# Altium footprint library WR-TBL_Pluggable Connector_3.50mm.PcbLib: 175 footprints (part 2 of 11)
Each footprint in its own frame and in the unit in brackets; x right, y up, seen from the top. Pads: shape width x height; smd on the part's side, far side on the other; paste and mask are expansions set on the pad; w line width, h text height; cw(c..) or ccw(c..) is an arc to the next point about the centre after c.
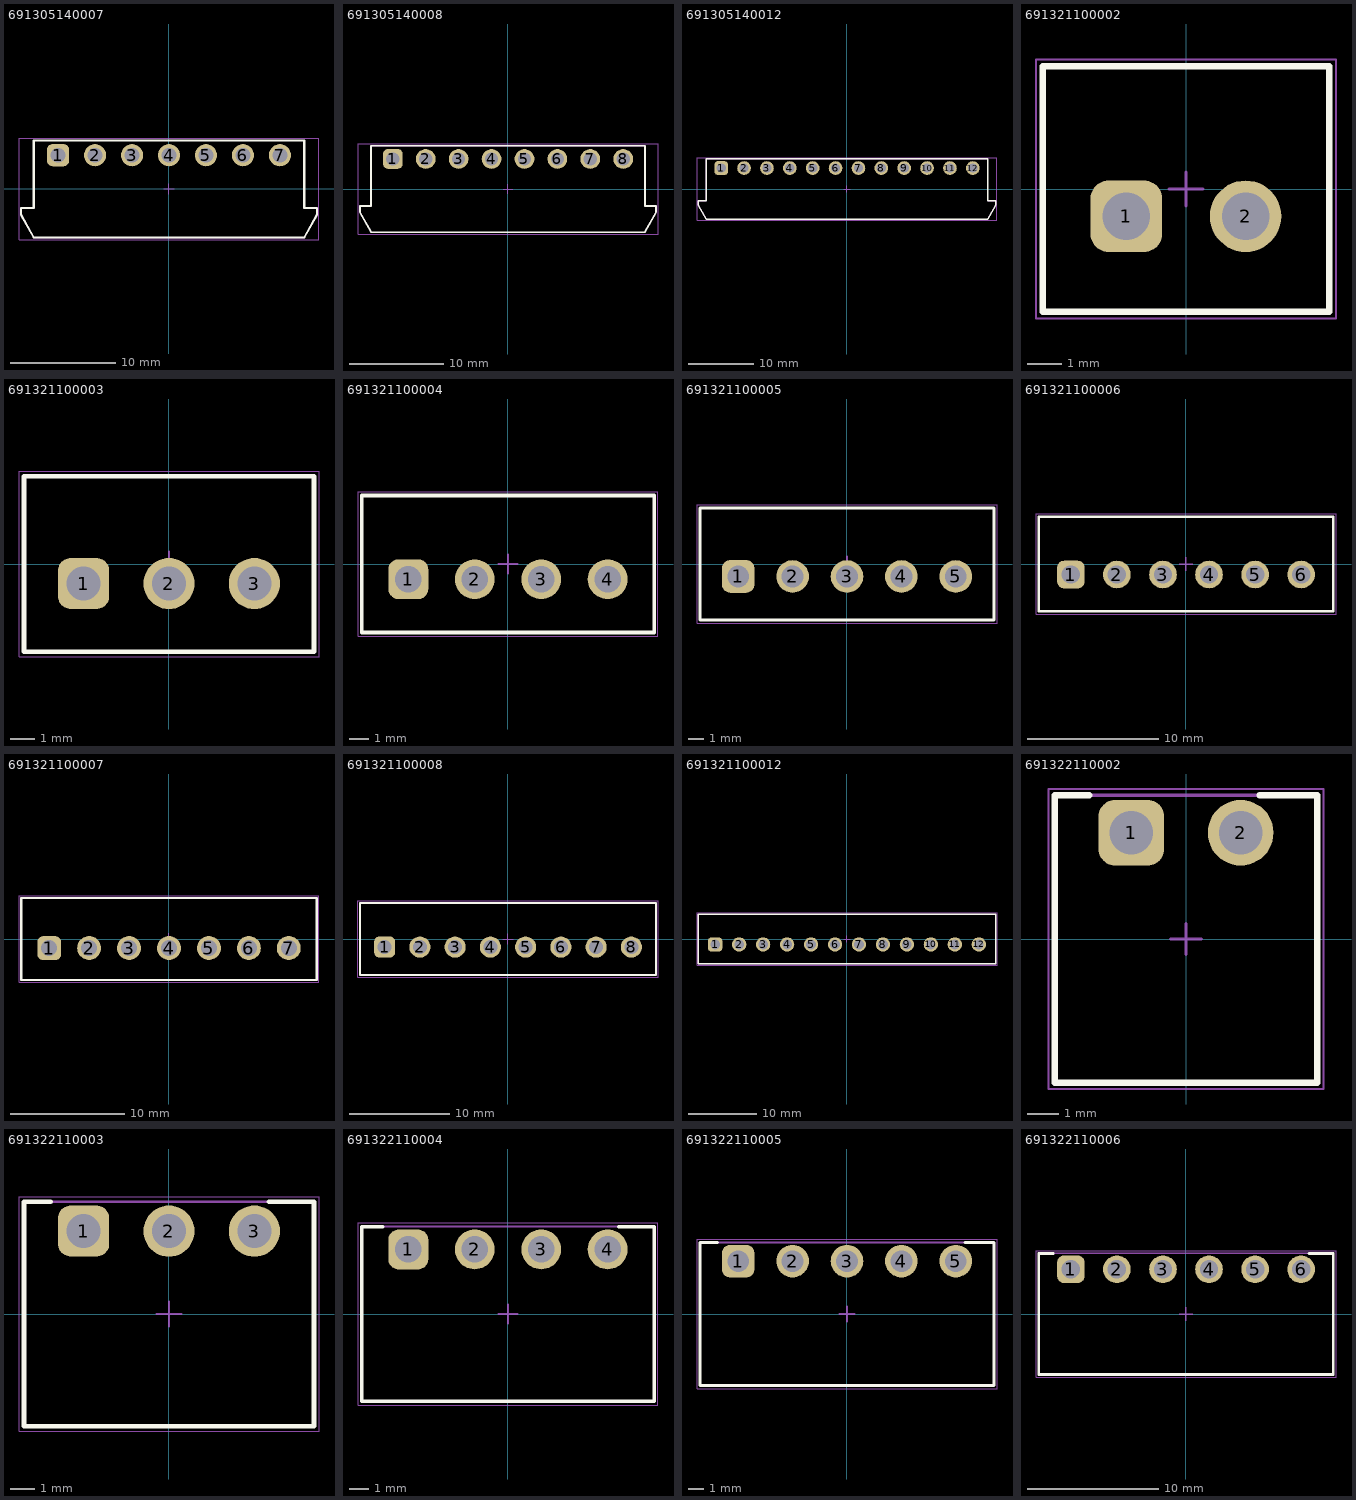
[diagram p1: the footprints below, top view; thin cyan lines are the x and y axes]

## 691305140007 [mm] "Horizontal PCB Header with Plastic Latch, pitch 3.5mm, 07p"
height 7
pads (7):
  rrect50% 2.1x2.1 hole 1.4: 1(-10.5,3.2)
  round 2.1 hole 1.4: 2(-7,3.2) 3(-3.5,3.2) 4(0,3.2) 5(3.5,3.2) 6(7,3.2) 7(10.5,3.2)
Top Overlay:
  lines w0.2: -14.001,-2.451 -12.8,-4.6 12.8,-4.6 14.001,-2.451 ; -14,-2.45 -14,-1.8 -12.8,-1.8 -12.8,4.6 12.8,4.6 12.8,-1.8 14,-1.8 14,-2.45
Top Assembly:
  lines w0.1: -14.001,-2.451 -12.8,-4.6 12.8,-4.6 14.001,-2.451 ; -14,-2.45 -14,-1.8 -12.8,-1.8 -12.8,4.6 12.8,4.6 12.8,-1.8 14,-1.8 14,-2.45
Top Designator:
  text ".Designator" at -3.647,-0.357 h1
Top 3D Body:
  lines w0.1: -14.001,-2.451 -12.8,-4.6 12.8,-4.6 14.001,-2.451 ; -14,-2.45 -14,-1.8 -12.8,-1.8 -12.8,4.6 12.8,4.6 12.8,-1.8 14,-1.8 14,-2.45
Top Courtyard:
  lines w0.05: -14.2,-4.8 -14.2,4.8 14.2,4.8 14.2,-4.8 -14.2,-4.8
Top Component Center:
  lines w0.1: -0.5,0 0.5,0 ; 0,-0.5 0,0.5
3D body "691305140007.stp": height 7.25, standoff -3.45, extent -14,-4.6 14,4.6

## 691305140008 [mm] "Horizontal PCB Header with Plastic Latch, pitch 3.5mm, 08p"
height 7
pads (8):
  rrect50% 2.1x2.1 hole 1.4: 1(-12.25,3.2)
  round 2.1 hole 1.4: 2(-8.75,3.2) 3(-5.25,3.2) 4(-1.75,3.2) 5(1.75,3.2) 6(5.25,3.2) 7(8.75,3.2) 8(12.25,3.2)
Top Overlay:
  lines w0.2: -15.751,-2.451 -14.55,-4.6 14.55,-4.6 15.751,-2.451 ; -15.75,-2.45 -15.75,-1.8 -14.55,-1.8 -14.55,4.6 14.55,4.6 14.55,-1.8 15.75,-1.8 15.75,-2.45
Top Assembly:
  lines w0.1: -15.751,-2.451 -14.55,-4.6 14.55,-4.6 15.751,-2.451 ; -15.75,-2.45 -15.75,-1.8 -14.55,-1.8 -14.55,4.6 14.55,4.6 14.55,-1.8 15.75,-1.8 15.75,-2.45
Top Designator:
  text ".Designator" at -3.647,-0.357 h1
Top 3D Body:
  lines w0.1: -15.751,-2.451 -14.55,-4.6 14.55,-4.6 15.751,-2.451 ; -15.75,-2.45 -15.75,-1.8 -14.55,-1.8 -14.55,4.6 14.55,4.6 14.55,-1.8 15.75,-1.8 15.75,-2.45
Top Courtyard:
  lines w0.05: -15.95,-4.8 -15.95,4.8 15.95,4.8 15.95,-4.8 -15.95,-4.8
Top Component Center:
  lines w0.1: -0.5,0 0.5,0 ; 0,-0.5 0,0.5
3D body "691305140008.stp": height 7.25, standoff -3.45, extent -15.75,-4.6 15.75,4.6

## 691305140012 [mm] "Horizontal PCB Header with Plastic Latch, pitch 3.5mm, 12p"
height 7
pads (12):
  rrect50% 2.1x2.1 hole 1.4: 1(-19.25,3.2)
  round 2.1 hole 1.4: 2(-15.75,3.2) 3(-12.25,3.2) 4(-8.75,3.2) 5(-5.25,3.2) 6(-1.75,3.2) 7(1.75,3.2) 8(5.25,3.2) 9(8.75,3.2) 10(12.25,3.2) 11(15.75,3.2) 12(19.25,3.2)
Top Overlay:
  lines w0.2: -22.751,-2.451 -21.55,-4.6 21.55,-4.6 22.751,-2.451 ; -22.75,-2.45 -22.75,-1.8 -21.55,-1.8 -21.55,4.6 21.55,4.6 21.55,-1.8 22.75,-1.8 22.75,-2.45
Top Assembly:
  lines w0.1: -22.751,-2.451 -21.55,-4.6 21.55,-4.6 22.751,-2.451 ; -22.75,-2.45 -22.75,-1.8 -21.55,-1.8 -21.55,4.6 21.55,4.6 21.55,-1.8 22.75,-1.8 22.75,-2.45
Top Designator:
  text ".Designator" at -3.647,-0.357 h1
Top 3D Body:
  lines w0.1: -22.751,-2.451 -21.55,-4.6 21.55,-4.6 22.751,-2.451 ; -22.75,-2.45 -22.75,-1.8 -21.55,-1.8 -21.55,4.6 21.55,4.6 21.55,-1.8 22.75,-1.8 22.75,-2.45
Top Courtyard:
  lines w0.05: -22.95,-4.8 22.95,-4.8 22.95,4.8 -22.95,4.8 -22.95,-4.8
Top Component Center:
  lines w0.1: -0.5,0 0.5,0 ; 0,-0.5 0,0.5
3D body "691305140012.stp": height 7.25, standoff -3.45, extent -22.75,-4.6 22.75,4.6

## 691321100002 [mm] "Vertical PCB Header, pitch 3.5mm, 02p"
height 9.2
pads (2):
  rrect50% 2.1x2.1 hole 1.4: 1(-1.75,-0.8)
  round 2.1 hole 1.4: 2(1.75,-0.8)
Top Overlay:
  lines w0.2: -4.2,-3.6 4.2,-3.6 4.2,3.6 -4.2,3.6 -4.2,-3.6
Top Assembly:
  lines w0.1: -4.2,-3.6 -4.2,3.6 4.2,3.6 4.2,-3.6 -4.2,-3.6
Top Designator:
  text ".Designator" at -3.647,-0.357 h1
Top 3D Body:
  lines w0.1: -4.2,-3.6 4.2,-3.6 4.2,3.6 -4.2,3.6 -4.2,-3.6
Top Courtyard:
  lines w0.05: -4.4,-3.8 4.4,-3.8 4.4,3.8 -4.4,3.8 -4.4,-3.8
Top Component Center:
  lines w0.1: -0.5,0 0.5,0 ; 0,-0.5 0,0.5
3D body "691321100002.stp": height 9.3, standoff -3.4, extent -4.2,-3.6 4.2,3.6

## 691321100003 [mm] "Vertical PCB Header, pitch 3.5mm, 03p"
height 9.2
pads (3):
  rrect50% 2.1x2.1 hole 1.4: 1(-3.5,-0.8)
  round 2.1 hole 1.4: 2(0,-0.8) 3(3.5,-0.8)
Top Overlay:
  lines w0.2: -5.95,-3.6 5.95,-3.6 5.95,3.6 -5.95,3.6 -5.95,-3.6
Top Assembly:
  lines w0.1: -5.95,-3.6 -5.95,3.6 5.95,3.6 5.95,-3.6 -5.95,-3.6
Top Designator:
  text ".Designator" at -3.647,-0.357 h1
Top 3D Body:
  lines w0.1: -5.95,-3.6 5.95,-3.6 5.95,3.6 -5.95,3.6 -5.95,-3.6
Top Courtyard:
  lines w0.05: -6.15,-3.8 6.15,-3.8 6.15,3.8 -6.15,3.8 -6.15,-3.8
Top Component Center:
  lines w0.1: -0.5,0 0.5,0 ; 0,-0.5 0,0.5
3D body "691321100003.stp": height 9.3, standoff -3.4, extent -5.95,-3.6 5.95,3.6

## 691321100004 [mm] "Vertical PCB Header, pitch 3.5mm, 04p"
height 9.2
pads (4):
  rrect50% 2.1x2.1 hole 1.4: 1(-5.25,-0.8)
  round 2.1 hole 1.4: 2(-1.75,-0.8) 3(1.75,-0.8) 4(5.25,-0.8)
Top Overlay:
  lines w0.2: -7.7,-3.6 -7.7,3.6 7.7,3.6 7.7,-3.6 -7.7,-3.6
Top Assembly:
  lines w0.1: -7.7,-3.6 7.7,-3.6 7.7,3.6 -7.7,3.6 -7.7,-3.6
Top Designator:
  text ".Designator" at -3.647,-0.357 h1
Top 3D Body:
  lines w0.1: -7.7,-3.6 -7.7,3.6 7.7,3.6 7.7,-3.6 -7.7,-3.6
Top Courtyard:
  lines w0.05: -7.9,-3.8 -7.9,3.8 7.9,3.8 7.9,-3.8 -7.9,-3.8
Top Component Center:
  lines w0.1: -0.5,0 0.5,0 ; 0,-0.5 0,0.5
3D body "691321100004.stp": height 9.3, standoff -3.4, extent -7.7,-3.6 7.7,3.6

## 691321100005 [mm] "Vertical PCB Header, pitch 3.5mm, 05p"
height 9.2
pads (5):
  rrect50% 2.1x2.1 hole 1.4: 1(-7,-0.8)
  round 2.1 hole 1.4: 2(-3.5,-0.8) 3(0,-0.8) 4(3.5,-0.8) 5(7,-0.8)
Top Overlay:
  lines w0.2: -9.45,-3.6 -9.45,3.6 9.45,3.6 9.45,-3.6 -9.45,-3.6
Top Assembly:
  lines w0.1: -9.45,-3.6 9.45,-3.6 9.45,3.6 -9.45,3.6 -9.45,-3.6
Top Designator:
  text ".Designator" at -3.647,-0.357 h1
Top 3D Body:
  lines w0.1: -9.45,-3.6 -9.45,3.6 9.45,3.6 9.45,-3.6 -9.45,-3.6
Top Courtyard:
  lines w0.05: -9.65,-3.8 -9.65,3.8 9.65,3.8 9.65,-3.8 -9.65,-3.8
Top Component Center:
  lines w0.1: -0.5,0 0.5,0 ; 0,-0.5 0,0.5
3D body "691321100005.stp": height 9.3, standoff -3.4, extent -9.45,-3.6 9.45,3.6

## 691321100006 [mm] "Vertical PCB Header, pitch 3.5mm, 06p"
height 9.2
pads (6):
  rrect50% 2.1x2.1 hole 1.4: 1(-8.75,-0.8)
  round 2.1 hole 1.4: 2(-5.25,-0.8) 3(-1.75,-0.8) 4(1.75,-0.8) 5(5.25,-0.8) 6(8.75,-0.8)
Top Overlay:
  lines w0.2: -11.2,-3.6 -11.2,3.6 11.2,3.6 11.2,-3.6 -11.2,-3.6
Top Assembly:
  lines w0.1: -11.2,-3.6 11.2,-3.6 11.2,3.6 -11.2,3.6 -11.2,-3.6
Top Designator:
  text ".Designator" at -3.647,-0.357 h1
Top 3D Body:
  lines w0.1: -11.2,-3.6 -11.2,3.6 11.2,3.6 11.2,-3.6 -11.2,-3.6
Top Courtyard:
  lines w0.05: -11.4,-3.8 -11.4,3.8 11.4,3.8 11.4,-3.8 -11.4,-3.8
Top Component Center:
  lines w0.1: -0.5,0 0.5,0 ; 0,-0.5 0,0.5
3D body "691321100006.stp": height 9.3, standoff -3.4, extent -11.2,-3.6 11.2,3.6

## 691321100007 [mm] "Vertical PCB Header, pitch 3.5mm, 07p"
height 9.2
pads (7):
  rrect50% 2.1x2.1 hole 1.4: 1(-10.5,-0.8)
  round 2.1 hole 1.4: 2(-7,-0.8) 3(-3.5,-0.8) 4(0,-0.8) 5(3.5,-0.8) 6(7,-0.8) 7(10.5,-0.8)
Top Overlay:
  lines w0.2: -12.95,-3.6 -12.95,3.6 12.95,3.6 12.95,-3.6 -12.95,-3.6
Top Assembly:
  lines w0.1: -12.95,-3.6 12.95,-3.6 12.95,3.6 -12.95,3.6 -12.95,-3.6
Top Designator:
  text ".Designator" at -3.647,-0.357 h1
Top 3D Body:
  lines w0.1: -12.95,-3.6 -12.95,3.6 12.95,3.6 12.95,-3.6 -12.95,-3.6
Top Courtyard:
  lines w0.05: -13.15,-3.8 -13.15,3.8 13.15,3.8 13.15,-3.8 -13.15,-3.8
Top Component Center:
  lines w0.1: -0.5,0 0.5,0 ; 0,-0.5 0,0.5
3D body "691321100007.stp": height 9.3, standoff -3.4, extent -12.95,-3.6 12.95,3.6

## 691321100008 [mm] "Vertical PCB Header, pitch 3.5mm, 08p"
height 9.2
pads (8):
  rrect50% 2.1x2.1 hole 1.4: 1(-12.25,-0.8)
  round 2.1 hole 1.4: 2(-8.75,-0.8) 3(-5.25,-0.8) 4(-1.75,-0.8) 5(1.75,-0.8) 6(5.25,-0.8) 7(8.75,-0.8) 8(12.25,-0.8)
Top Overlay:
  lines w0.2: -14.7,-3.6 14.7,-3.6 14.7,3.6 -14.7,3.6 -14.7,-3.6
Top Assembly:
  lines w0.1: -14.7,-3.6 -14.7,3.6 14.7,3.6 14.7,-3.6 -14.7,-3.6
Top Designator:
  text ".Designator" at -3.647,-0.357 h1
Top 3D Body:
  lines w0.1: -14.7,-3.6 14.7,-3.6 14.7,3.6 -14.7,3.6 -14.7,-3.6
Top Courtyard:
  lines w0.05: -14.9,-3.8 14.9,-3.8 14.9,3.8 -14.9,3.8 -14.9,-3.8
Top Component Center:
  lines w0.1: -0.5,0 0.5,0 ; 0,-0.5 0,0.5
3D body "691321100008.stp": height 9.3, standoff -3.4, extent -14.7,-3.6 14.7,3.6

## 691321100012 [mm] "Vertical PCB Header, pitch 3.5mm, 12p"
height 9.2
pads (12):
  rrect50% 2.1x2.1 hole 1.4: 1(-19.25,-0.8)
  round 2.1 hole 1.4: 2(-15.75,-0.8) 3(-12.25,-0.8) 4(-8.75,-0.8) 5(-5.25,-0.8) 6(-1.75,-0.8) 7(1.75,-0.8) 8(5.25,-0.8) 9(8.75,-0.8) 10(12.25,-0.8) 11(15.75,-0.8) 12(19.25,-0.8)
Top Overlay:
  lines w0.2: -21.7,-3.6 -21.7,3.6 21.7,3.6 21.7,-3.6 -21.7,-3.6
Top Assembly:
  lines w0.1: -21.7,-3.6 21.7,-3.6 21.7,3.6 -21.7,3.6 -21.7,-3.6
Top Designator:
  text ".Designator" at -3.647,-0.357 h1
Top 3D Body:
  lines w0.1: -21.7,-3.6 -21.7,3.6 21.7,3.6 21.7,-3.6 -21.7,-3.6
Top Courtyard:
  lines w0.05: -21.9,-3.8 -21.9,3.8 21.9,3.8 21.9,-3.8 -21.9,-3.8
Top Component Center:
  lines w0.1: -0.5,0 0.5,0 ; 0,-0.5 0,0.5
3D body "691321100012.stp": height 9.3, standoff -3.4, extent -21.7,-3.6 21.7,3.6

## 691322110002 [mm] "Horizontal PCB Header, pitch 3.5mm, 02p"
height 7
pads (2):
  rrect50% 2.1x2.1 hole 1.4: 1(-1.75,3.4)
  round 2.1 hole 1.4: 2(1.75,3.4)
Top Overlay:
  lines w0.2: -3.1,4.6 -4.2,4.6 -4.2,-4.6 4.2,-4.6 4.2,4.6 2.35,4.6
Top Assembly:
  lines w0.1: -4.2,-4.6 -4.2,4.6 4.2,4.6 4.2,-4.6 -4.2,-4.6
Top Designator:
  text ".Designator" at -3.647,-0.357 h1
Top 3D Body:
  lines w0.1: -4.2,-4.6 4.2,-4.6 4.2,4.6 -4.2,4.6 -4.2,-4.6
Top Courtyard:
  lines w0.05: -4.4,-4.8 -4.4,4.8 4.4,4.8 4.4,-4.8 -4.4,-4.8
Top Component Center:
  lines w0.1: -0.5,0 0.5,0 ; 0,-0.5 0,0.5
3D body "691322110002.stp": height 7.3, standoff -3.4, extent -4.2,-4.6 4.2,4.6

## 691322110003 [mm] "Horizontal PCB Header, pitch 3.5mm, 03p"
height 7
pads (3):
  rrect50% 2.1x2.1 hole 1.4: 1(-3.5,3.4)
  round 2.1 hole 1.4: 2(0,3.4) 3(3.5,3.4)
Top Overlay:
  lines w0.2: -4.85,4.6 -5.95,4.6 -5.95,-4.6 5.95,-4.6 5.95,4.6 4.1,4.6
Top Assembly:
  lines w0.1: -5.95,-4.6 5.95,-4.6 5.95,4.6 -5.95,4.6 -5.95,-4.6
Top Designator:
  text ".Designator" at -3.647,-0.357 h1
Top 3D Body:
  lines w0.1: -5.95,-4.6 -5.95,4.6 5.95,4.6 5.95,-4.6 -5.95,-4.6
Top Courtyard:
  lines w0.05: -6.15,-4.8 6.15,-4.8 6.15,4.8 -6.15,4.8 -6.15,-4.8
Top Component Center:
  lines w0.1: -0.5,0 0.5,0 ; 0,-0.5 0,0.5
3D body "691322110003.stp": height 7.3, standoff -3.4, extent -5.95,-4.6 5.95,4.6

## 691322110004 [mm] "Horizontal PCB Header, pitch 3.5mm, 04p"
height 7
pads (4):
  rrect50% 2.1x2.1 hole 1.4: 1(-5.25,3.4)
  round 2.1 hole 1.4: 2(-1.75,3.4) 3(1.75,3.4) 4(5.25,3.4)
Top Overlay:
  lines w0.2: -6.6,4.6 -7.7,4.6 -7.7,-4.6 7.7,-4.6 7.7,4.6 5.85,4.6
Top Assembly:
  lines w0.1: -7.7,-4.6 -7.7,4.6 7.7,4.6 7.7,-4.6 -7.7,-4.6
Top Designator:
  text ".Designator" at -3.647,-0.357 h1
Top 3D Body:
  lines w0.1: -7.7,-4.6 7.7,-4.6 7.7,4.6 -7.7,4.6 -7.7,-4.6
Top Courtyard:
  lines w0.05: -7.9,-4.8 -7.9,4.8 7.9,4.8 7.9,-4.8 -7.9,-4.8
Top Component Center:
  lines w0.1: -0.5,0 0.5,0 ; 0,-0.5 0,0.5
3D body "691322110004.stp": height 7.3, standoff -3.4, extent -7.7,-4.6 7.7,4.6

## 691322110005 [mm] "Horizontal PCB Header, pitch 3.5mm, 05p"
height 7
pads (5):
  rrect50% 2.1x2.1 hole 1.4: 1(-7,3.4)
  round 2.1 hole 1.4: 2(-3.5,3.4) 3(0,3.4) 4(3.5,3.4) 5(7,3.4)
Top Overlay:
  lines w0.2: -8.35,4.6 -9.45,4.6 -9.45,-4.6 9.45,-4.6 9.45,4.6 7.6,4.6
Top Assembly:
  lines w0.1: -9.45,-4.6 9.45,-4.6 9.45,4.6 -9.45,4.6 -9.45,-4.6
Top Designator:
  text ".Designator" at -3.647,-0.357 h1
Top 3D Body:
  lines w0.1: -9.45,-4.6 -9.45,4.6 9.45,4.6 9.45,-4.6 -9.45,-4.6
Top Courtyard:
  lines w0.05: -9.65,-4.8 9.65,-4.8 9.65,4.8 -9.65,4.8 -9.65,-4.8
Top Component Center:
  lines w0.1: -0.5,0 0.5,0 ; 0,-0.5 0,0.5
3D body "691322110005.stp": height 7.3, standoff -3.4, extent -9.45,-4.6 9.45,4.6

## 691322110006 [mm] "Horizontal PCB Header, pitch 3.5mm, 06p"
height 7
pads (6):
  rrect50% 2.1x2.1 hole 1.4: 1(-8.75,3.4)
  round 2.1 hole 1.4: 2(-5.25,3.4) 3(-1.75,3.4) 4(1.75,3.4) 5(5.25,3.4) 6(8.75,3.4)
Top Overlay:
  lines w0.2: -10.1,4.6 -11.2,4.6 -11.2,-4.6 11.2,-4.6 11.2,4.6 9.35,4.6
Top Assembly:
  lines w0.1: -11.2,-4.6 -11.2,4.6 11.2,4.6 11.2,-4.6 -11.2,-4.6
Top Designator:
  text ".Designator" at -3.647,-0.357 h1
Top 3D Body:
  lines w0.1: -11.2,-4.6 11.2,-4.6 11.2,4.6 -11.2,4.6 -11.2,-4.6
Top Courtyard:
  lines w0.05: -11.4,-4.8 -11.4,4.8 11.4,4.8 11.4,-4.8 -11.4,-4.8
Top Component Center:
  lines w0.1: -0.5,0 0.5,0 ; 0,-0.5 0,0.5
3D body "691322110006.stp": height 7.3, standoff -3.4, extent -11.2,-4.6 11.2,4.6